# Altium integrated library VIETTIEN.IntLib: 150 symbols (part 3 of 7)

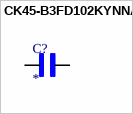
[diagram p46: symbol CK45-B3FD102KYNNA]

## CK45-B3FD102KYNNA
designator C?
1000 pF Â±10% 3000V (3kV) Ceramic Capacitor B Radial, Disc; MF: TDK; MP: CK45-B3FD102KYNNA; SnapEDA_Link: https://www.snapeda.com/parts/CK45-B3FD102KYNNA/TDK/view-part/?ref=snap; Package: None; Value: *; Check_prices: https://www.snapeda.com/parts/CK45-B3FD102KYNNA/TDK/view-part/?ref=eda
footprint CAPRB750W60L900T600H1300
pins: 1, 2


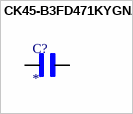
[diagram p47: symbol CK45-B3FD471KYGNA]

## CK45-B3FD471KYGNA
designator C?
MF: {'manufacturer': u'TDK'}; MP: CK45-B3FD471KYGNA; Package: None; Price: None; Value: *; Availability: Unavailable
footprint CAPRB750W60L700T600H1100
pins: 1, 2


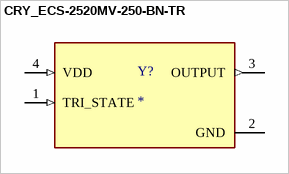
[diagram p48: symbol CRY_ECS-2520MV-250-BN-TR]

## CRY_ECS-2520MV-250-BN-TR
designator Y?
25 MHz XO (Standard) HCMOS Oscillator 1.6V ~ 3.6V Enable/Disable 4-SMD, No Lead; MF: ECS Inc.; MP: ECS-2520MV-250-BN-TR; SnapEDA_Link: https://www.snapeda.com/parts/ECS-2520MV-250-BN-TR/ECS/view-part/?ref=snap; Package: ECS-2520MV-0-4 ECS; Value: *; Check_prices: https://www.snapeda.com/parts/ECS-2520MV-250-BN-TR/ECS/view-part/?ref=eda
footprint OSC_ECS-2520S25-250-FN-TR
pins: 1 TRI_STATE (in), 2 GND (power), 3 OUTPUT (out), 4 VDD (in)


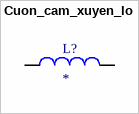
[diagram p49: symbol Cuon_cam_xuyen_lo]

## Cuon_cam_xuyen_lo
designator L?
Inductor 50125-33uH 8A; MF: {'manufacturer': u'W\xfcrth Elektronik'}; MP: 7447076; Package: None; Price: None; Value: *; Availability: Unavailable
footprint WE-FI_7447076
pins: 1, 2


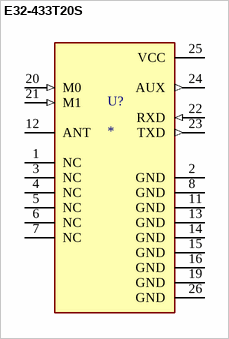
[diagram p50: symbol E32-433T20S]

## E32-433T20S
designator U?
Wireless serial port module (UART); MP: E32-433T20S; MF: EBYTE; Check_prices: https://www.snapeda.com/parts/E32-433T20S/EBYTE/view-part/?ref=eda; Package: Package; Value: *; SnapEDA_Link: https://www.snapeda.com/parts/E32-433T20S/EBYTE/view-part/?ref=snap; Price: None; Availability: Not in stock
footprint MODULE_E32-433T20S
pins: 1 NC, 2 GND (power), 3 NC, 4 NC, 5 NC, 6 NC, 7 NC, 8 GND (power), 11 GND (power), 12 ANT, 13 GND (power), 14 GND (power), 15 GND (power), 16 GND (power), 19 GND (power), 20 M0 (in), 21 M1 (in), 22 RXD (in), 23 TXD (out), 24 AUX (out), 25 VCC (power), 26 GND (power)


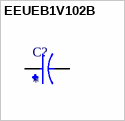
[diagram p51: symbol EEUEB1V102B]

## EEUEB1V102B
designator C?
Cap Aluminum 1000uF 35V 20% (12.5 X 25mm) Radial 5mm 586mA 10000 hr 105C Ammo Pack; MP: EEU-EB1V102B; MF: Panasonic; Check_prices: https://www.snapeda.com/parts/EEU-EB1V102B/Panasonic/view-part/?ref=eda; Package: RADIAL-2 Panasonic; SnapEDA_Link: https://www.snapeda.com/parts/EEU-EB1V102B/Panasonic/view-part/?ref=snap; Value: *; Purchase-URL: https://pricing.snapeda.com/search/part/EEU-EB1V102B/?ref=eda; Price: None; Availability: In Stock
footprint CAPPRD500W60D1250H2500
pins: N, P


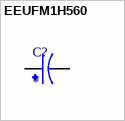
[diagram p52: symbol EEUFM1H560]

## EEUFM1H560
designator C?
Cap Aluminum Lytic 56uF 50V 20% (6 X 11.2mm) Radial 2.5mm 405mA 2000h 105C Bulk; MP: EEU-FM1H560; MF: Panasonic; Availability: In Stock; Purchase-URL: https://pricing.snapeda.com/search/part/EEU-FM1H560/?ref=eda; Package: RADIAL-2 Panasonic; Value: *; Check_prices: https://www.snapeda.com/parts/EEU-FM1H560/Panasonic/view-part/?ref=eda; SnapEDA_Link: https://www.snapeda.com/parts/EEU-FM1H560/Panasonic/view-part/?ref=snap; Price: None
footprint CAPPRD250W50D630H1120
pins: N, P


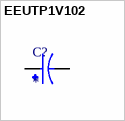
[diagram p53: symbol EEUTP1V102]

## EEUTP1V102
designator C?
1000ÂµF 35V Aluminum Electrolytic Capacitors Radial, Can 5000 Hrs @ 125Â°C; MF: Panasonic; MP: EEUTP1V102; SnapEDA_Link: https://www.snapeda.com/parts/EEUTP1V102/Panasonic/view-part/5792291/?ref=snap; Price: None; Check_prices: https://www.snapeda.com/parts/EEUTP1V102/Panasonic/view-part/5792291/?ref=eda; Package: RADIAL-2 Panasonic; Availability: In Stock; Value: *
footprint CAPPRD750W80D1600H2000
pins: N, P


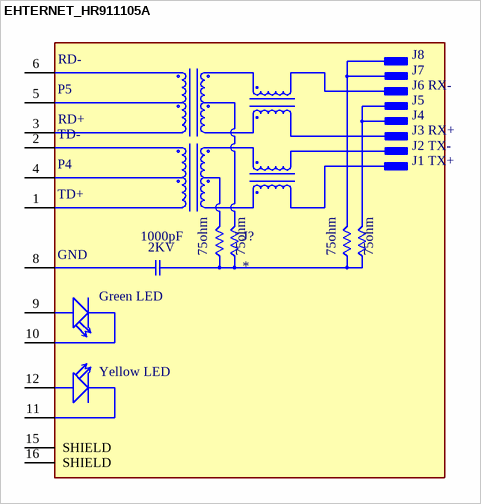
[diagram p54: symbol EHTERNET_HR911105A]

## EHTERNET_HR911105A
designator J?
DIP RJ45 Connector;; MP: HR911105A; MF: hanrun; SnapEDA_Link: https://www.snapeda.com/parts/HR911105A/HanRun/view-part/?ref=snap; Package: None; Check_prices: https://www.snapeda.com/parts/HR911105A/HanRun/view-part/?ref=eda; Price: None; Value: *; Availability: Not in stock
footprint HANRUN_HR911105A
pins: 1 TD+, 2 TD-, 3 RD+, 4 P4, 5 P5, 6 RD-, 8 GND (power), 9 GA, 10 GC, 11 YC, 12 YA, 15 SHIELD, 16 SHIELD
text: J8; J7; J6 RX-; J5; J4; J3 RX+; J2 TX-; J1 TX+; 1000pF; 2KV; 75ohm; Green LED; Yellow LED


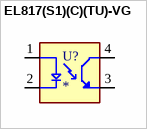
[diagram p55: symbol EL817(S1)(C)(TU)-VG]

## EL817(S1)(C)(TU)-VG
designator U?
Optoisolator Transistor Output 5000Vrms 1 Channel 4-SMD; MF: Everlight Electronics; MP: EL817(S1)(A)(TU)-VG; SnapEDA_Link: https://www.snapeda.com/parts/EL817(S1)(A)(TU)-VG/Everlight/view-part/?ref=snap; Package: NON STANDARD-4 Everlight; Value: *; Check_prices: https://www.snapeda.com/parts/EL817(S1)(A)(TU)-VG/Everlight/view-part/?ref=eda
footprint SOIC254P1030X390-4N_EL817(S1)(C)(TU)-VG
pins: 1 A, 2 C, 3 ET, 4 CT


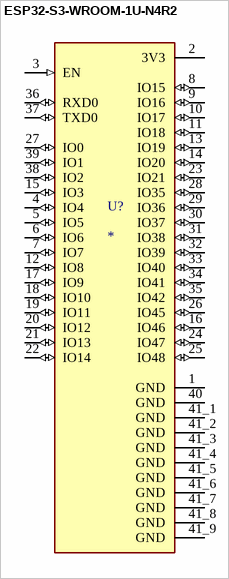
[diagram p56: symbol ESP32-S3-WROOM-1U-N4R2]

## ESP32-S3-WROOM-1U-N4R2
designator U?
MF: {'manufacturer': u'Espressif Systems'}; MP: ESP32-S3-WROOM-1U-N4R2; Package: None; Price: None; Value: *; Availability: Unavailable
footprint XCVR_ESP32-S3-WROOM-1U-N4R2
pins: 1 GND (power), 2 3V3 (power), 3 EN (in), 4 IO4 (io), 5 IO5 (io), 6 IO6 (io), 7 IO7 (io), 8 IO15 (io), 9 IO16 (io), 10 IO17 (io), 11 IO18 (io), 12 IO8 (io), 13 IO19 (io), 14 IO20 (io), 15 IO3 (io), 16 IO46 (io), 17 IO9 (io), 18 IO10 (io), 19 IO11 (io), 20 IO12 (io), 21 IO13 (io), 22 IO14 (io), 23 IO21 (io), 24 IO47 (io), 25 IO48 (io), 26 IO45 (io), 27 IO0 (io), 28 IO35 (io), 29 IO36 (io), 30 IO37 (io), 31 IO38 (io), 32 IO39 (io), 33 IO40 (io), 34 IO41 (io), 35 IO42 (io), 36 RXD0 (io), 37 TXD0 (io), 38 IO2 (io), 39 IO1 (io), 40 GND (power), 41_1 GND (power), 41_2 GND (power), 41_3 GND (power), 41_4 GND (power), 41_5 GND (power), 41_6 GND (power), 41_7 GND (power), 41_8 GND (power), 41_9 GND (power)


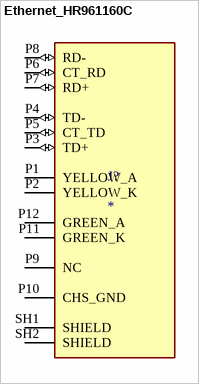
[diagram p57: symbol Ethernet_HR961160C]

## Ethernet_HR961160C
designator J?
1x1 Port Tab-UP Surface Mount RJ45 Connector with Magnetics Module and LEDfor 10/100Base-TX NIC Applications.; MF: HanRun; MP: HR961160C; SnapEDA_Link: https://www.snapeda.com/parts/HR961160C/HanRun/view-part/?ref=snap; Package: Package; Value: *; Check_prices: https://www.snapeda.com/parts/HR961160C/HanRun/view-part/?ref=eda
footprint HANRUN_HR961160C
pins: P1 YELLOW_A, P2 YELLOW_K, P3 TD+ (io), P4 TD- (io), P5 CT_TD (io), P6 CT_RD (io), P7 RD+ (io), P8 RD- (io), P9 NC, P10 CHS_GND (power), P11 GREEN_K, P12 GREEN_A, SH1 SHIELD, SH2 SHIELD


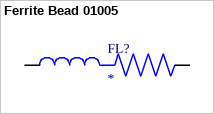
[diagram p58: symbol Ferrite Bead 01005]

## Ferrite Bead 01005
designator FL?
Ferrite Bead 01005; MP: BLF02JD361GNED; MF: Murata; Purchase-URL: https://pricing.snapeda.com/search/part/BLF02JD361GNED/?ref=eda; Package: 0402 Murata; SnapEDA_Link: https://www.snapeda.com/parts/BLF02JD361GNED/Murata/view-part/4302576/?ref=snap; Value: *; Availability: Good; Price: None; Check_prices: https://www.snapeda.com/parts/BLF02JD361GNED/Murata/view-part/4302576/?ref=eda
footprint BEADC0402X32N
pins: 1, 2


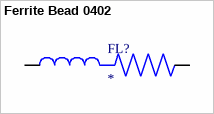
[diagram p59: symbol Ferrite Bead 0402]

## Ferrite Bead 0402
designator FL?
Ferrite Bead 0402; MF: Murata; MP: NFZ15SG151SN11D; SnapEDA_Link: https://www.snapeda.com/parts/NFZ15SG151SN11D/Murata/view-part/?ref=snap; Package: 1005 Taiyo Yuden; Value: *; Check_prices: https://www.snapeda.com/parts/NFZ15SG151SN11D/Murata/view-part/?ref=eda
footprint BEADC1005X55N
pins: 1, 2


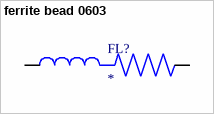
[diagram p60: symbol ferrite bead 0603]

## ferrite bead 0603
designator FL?
ferrite bead 0603; MP: BLM18BD421SZ1D; Package: None; Price: None; Value: *; Availability: Unavailable
footprint BEADC1608X95N
pins: 1, 2


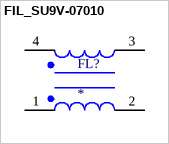
[diagram p61: symbol FIL_SU9V-07010]

## FIL_SU9V-07010
designator FL?
1 mH @ 1 kHz 2 Line Common Mode Choke Through Hole 700mA DCR 600mOhm; MF: Kemet; MP: SU9V-07010; SnapEDA_Link: https://www.snapeda.com/parts/SU9V-07010/Kemet/view-part/?ref=snap; Package: Vertical-4 Kemet; Value: *; Check_prices: https://www.snapeda.com/parts/SU9V-07010/Kemet/view-part/?ref=eda
footprint FIL_SU9V-07010
pins: 1, 2, 3, 4


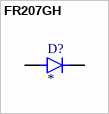
[diagram p62: symbol FR207GH]

## FR207GH
designator D?
500ns, 2A, 1000V, Fast Recovery Rectifier; MF: Taiwan Semiconductor Corporation; MP: FR207GH; SnapEDA_Link: https://www.snapeda.com/parts/FR207GH/Taiwan+Semiconductor/view-part/?ref=snap; Package: DO-15 Taiwan Semiconductor; Value: *; Check_prices: https://www.snapeda.com/parts/FR207GH/Taiwan+Semiconductor/view-part/?ref=eda
footprint DIOAD1300W80L670D310
pins: A, C K


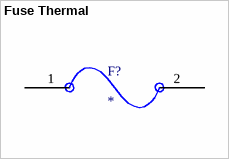
[diagram p63: symbol Fuse Thermal]

## Fuse Thermal
designator F?
Fuse, Resettable, Fast Acting, 10A, Sz 1206, 0.134x0.071x0.033", SMT, 24VDC, PCB | Bourns MF-NSMF200-2
footprint Fuse_thermal
pins: 1, 2


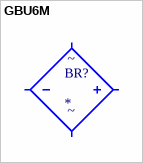
[diagram p64: symbol GBU6M]

## GBU6M
designator BR?
Bridge Rectifier Single Phase Standard 1 kV Through Hole GBU; MF: ON Semiconductor; MP: GBU6M; SnapEDA_Link: https://www.snapeda.com/parts/GBU6M/Onsemi/view-part/?ref=snap; Package: SIP-4 ON Semiconductor; Value: *; Check_prices: https://www.snapeda.com/parts/GBU6M/Onsemi/view-part/?ref=eda
footprint GBU_4L
pins: 1 (io), 2 (io), 3 (io), 4 (io)
text: ~


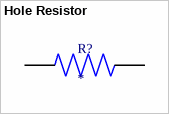
[diagram p65: symbol Hole Resistor]

## Hole Resistor
designator R?
X kOhms Â±1% 0.25W, 1/4W Through Hole Resistor Axial - Metal Film; MF: Yageo; MP: MFR-25FBF52-10K; SnapEDA_Link: https://www.snapeda.com/parts/MFR-25FBF52-10K/Yageo/view-part/?ref=snap; Package: RADIAL-2 YAGEO; Value: *; Check_prices: https://www.snapeda.com/parts/MFR-25FBF52-10K/Yageo/view-part/?ref=eda
footprint RESAD1100W55L680D260
pins: 1, 2


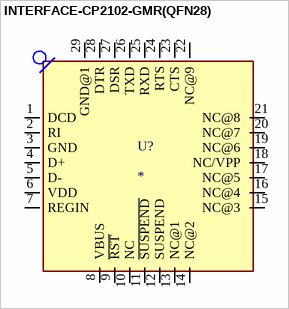
[diagram p66: symbol INTERFACE-CP2102-GMR(QFN28)]

## INTERFACE-CP2102-GMR(QFN28)
designator U?
USB Bridge, USB to UART USB 2.0 UART Interface 28-QFN (5x5); MP: CP2102-GMR; MF: Silicon; Price: None; Availability: In Stock; Package: VFQFN-28 Vishay Siliconix; SnapEDA_Link: https://www.snapeda.com/parts/CP2102-GMR/Silicon+Labs/view-part/?ref=snap; Check_prices: https://www.snapeda.com/parts/CP2102-GMR/Silicon+Labs/view-part/?ref=eda; Value: *; Purchase-URL: https://pricing.snapeda.com/search/part/CP2102-GMR/?ref=eda
footprint QFN28G_0.5-5X5MM
pins: 1 DCD (io), 2 RI (io), 3 GND (io), 4 D+ (io), 5 D- (io), 6 VDD (io), 7 REGIN (io), 8 VBUS (io), 9 ~{RST} (io), 10 NC (io), 11 ~{SUSPEND} (io), 12 SUSPEND (io), 13 NC@1 (io), 14 NC@2 (io), 15 NC@3 (io), 16 NC@4 (io), 17 NC@5 (io), 18 NC/VPP (io), 19 NC@6 (io), 20 NC@7 (io), 21 NC@8 (io), 22 NC@9 (io), 23 CTS (io), 24 RTS (io), 25 RXD (io), 26 TXD (io), 27 DSR (io), 28 DTR (io), 29 GND@1 (io)


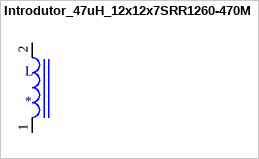
[diagram p67: symbol Introdutor_47uH_12x12x7SRR1260-470M]

## Introdutor_47uH_12x12x7SRR1260-470M
designator L
47ÂµH Shielded Wirewound Inductor 2.6A 86mOhm Max Nonstandard; MP: SRR1260-470M; MF: Bourns; Value: *; Package: Nonstandard Bourns; Price: None; SnapEDA_Link: https://www.snapeda.com/parts/SRR1260-470M/Bourns/view-part/283129/?ref=snap; Availability: Unavailable
footprint Introdutor_47uH_12x12x7
pins: 1, 2


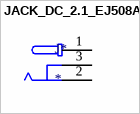
[diagram p68: symbol JACK_DC_2.1_EJ508A]

## JACK_DC_2.1_EJ508A
designator J*
Power Barrel Connector Jack 2.10mm ID _0.083_, 5.50mm OD _0.217_ Through Hole, Right Angle / EJ508A; MF: MPD; Package: Non-Standard MPD; Value: *; SnapEDA_Link: https://www.snapeda.com/parts/EJ508A/MPD%20%28Memory%20Protection%20Devices%29/view-part/474399/?ref=snap; Price: None; MP: EJ508A; Availability: Unavailable
footprint MPD_EJ508A
pins: 1, 2, 3
